# Altium schematic symbol library ADC.SchLib: 10 symbols
Pins are listed as number, name and electrical type; pins without a type are passive.

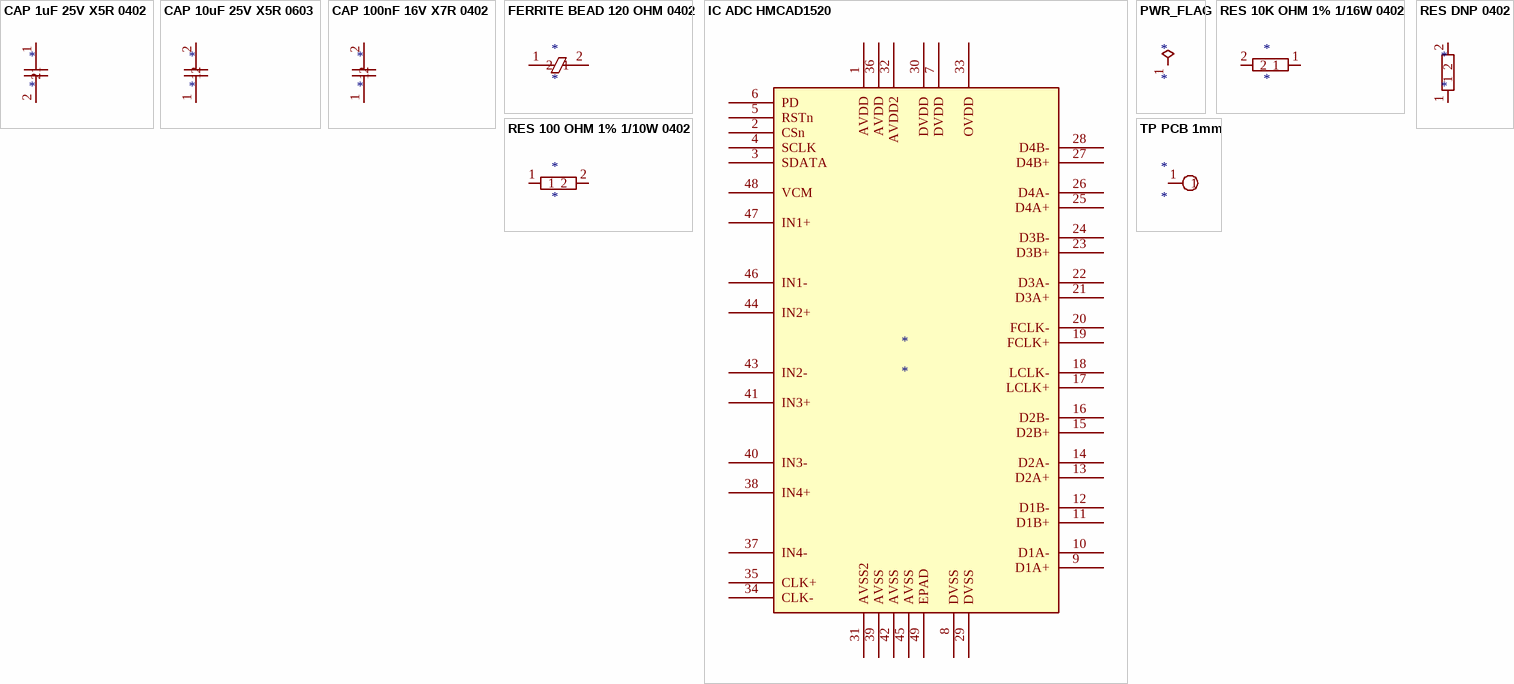
[diagram p0: symbols CAP 1uF 25V X5R 0402 to TP PCB 1mm]

## CAP 1uF 25V X5R 0402
designator *
pins: 1, 2

## CAP 10uF 25V X5R 0603
designator *
pins: 1, 2

## CAP 100nF 16V X7R 0402
designator *
pins: 1, 2

## FERRITE BEAD 120 OHM 0402
designator *
pins: 1, 2

## IC ADC HMCAD1520
designator *
pins: 1 AVDD, 2 CSn, 3 SDATA, 4 SCLK, 5 RSTn, 6 PD, 7 DVDD, 8 DVSS, 9 D1A+, 10 D1A-, 11 D1B+, 12 D1B-, 13 D2A+, 14 D2A-, 15 D2B+, 16 D2B-, 17 LCLK+, 18 LCLK-, 19 FCLK+, 20 FCLK-, 21 D3A+, 22 D3A-, 23 D3B+, 24 D3B-, 25 D4A+, 26 D4A-, 27 D4B+, 28 D4B-, 29 DVSS, 30 DVDD, 31 AVSS2, 32 AVDD2, 33 OVDD, 34 CLK-, 35 CLK+, 36 AVDD, 37 IN4-, 38 IN4+, 39 AVSS, 40 IN3-, 41 IN3+, 42 AVSS, 43 IN2-, 44 IN2+, 45 AVSS, 46 IN1-, 47 IN1+, 48 VCM, 49 EPAD

## PWR_FLAG
designator *  (graphical)
pins: 1

## RES 10K OHM 1% 1/16W 0402
designator *
pins: 1, 2

## RES 100 OHM 1% 1/10W 0402
designator *
pins: 1, 2

## RES DNP 0402
designator *
pins: 1, 2

## TP PCB 1mm
designator *
pins: 1